# Altium footprint library CustomCase.PcbLib: 411 footprints (part 25 of 26)
Each footprint in its own frame and in the unit in brackets; x right, y up, seen from the top. Pads: shape width x height; smd on the part's side, far side on the other; paste and mask are expansions set on the pad; w line width, h text height; cw(c..) or ccw(c..) is an arc to the next point about the centre after c.
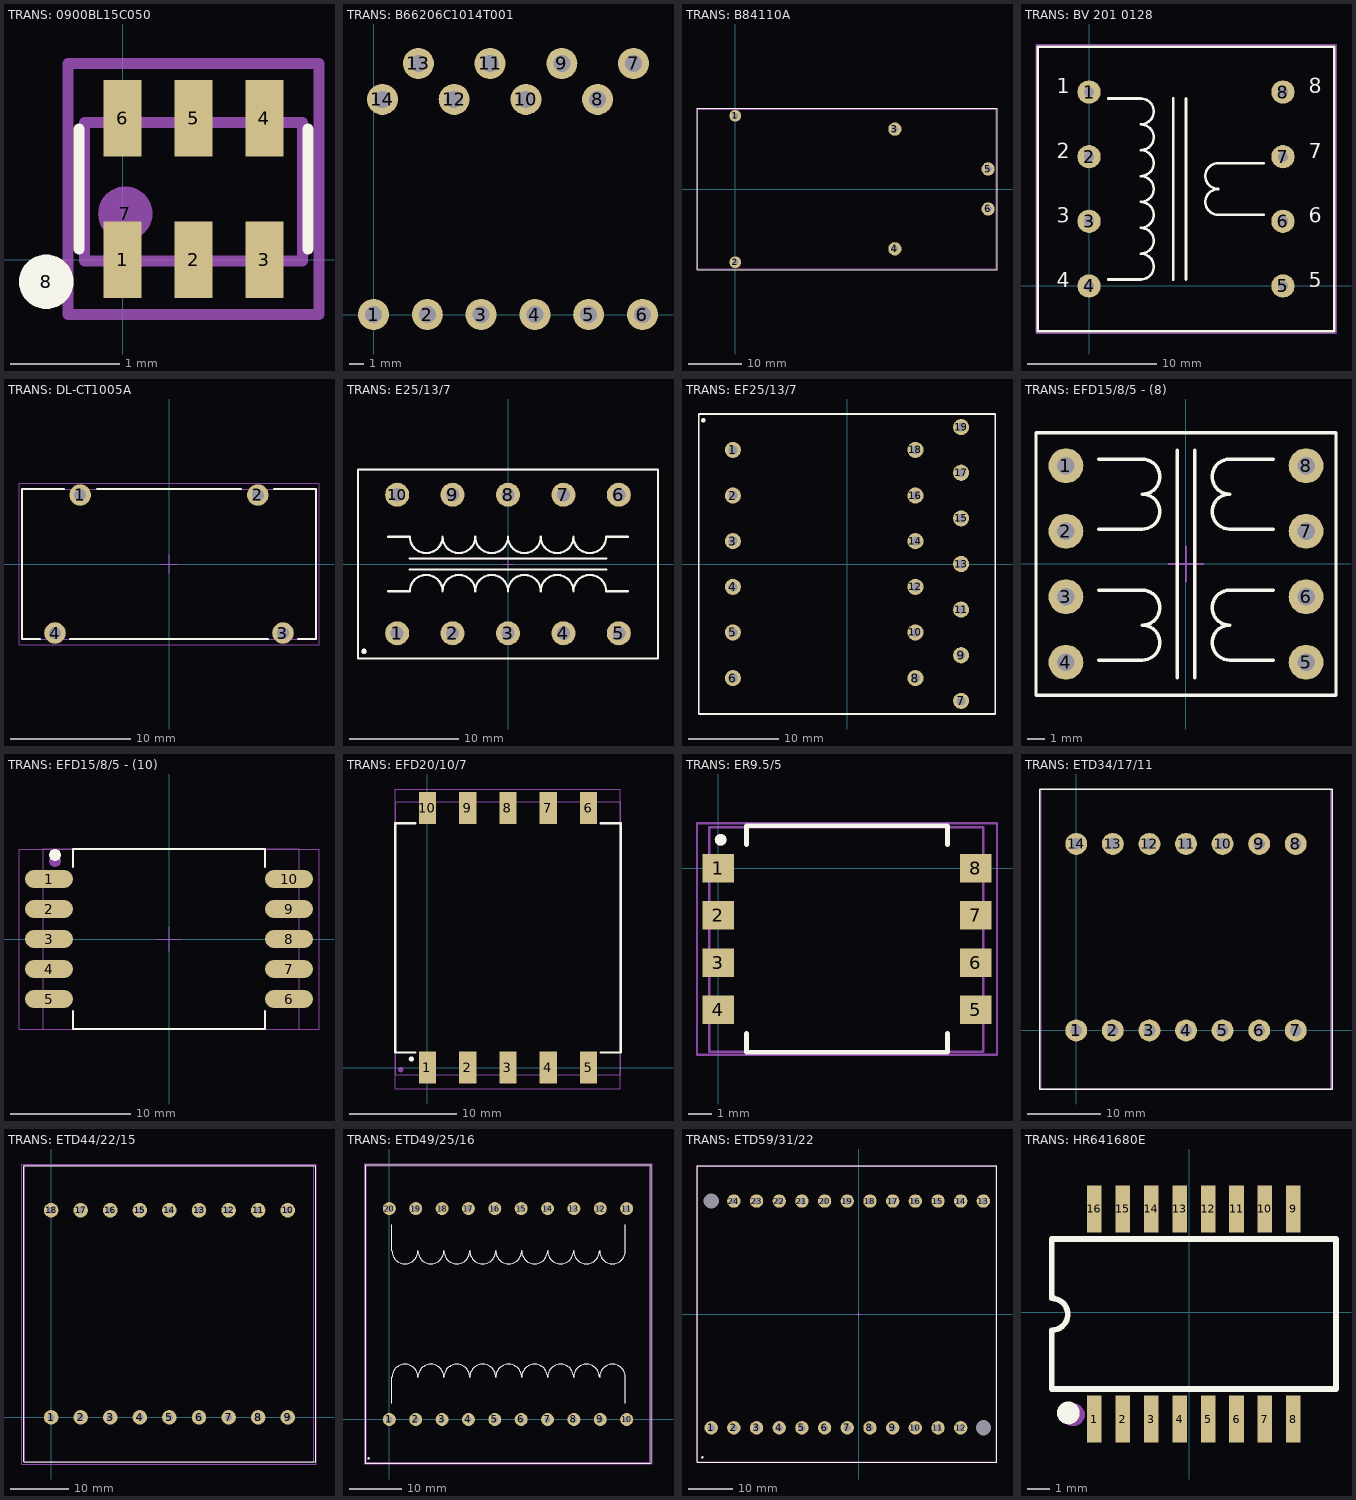
[diagram p24: the footprints below, top view; thin cyan lines are the x and y axes]

## TRANS: 0900BL15C050 [mm]
pads (8):
  rect 0.35x0.7 smd: 1(0,0) 2(0.65,0) 3(1.3,0) 4(1.3,1.3) 5(0.65,1.3) 6(0,1.3)
  round 0.5 on Mech1: 7(0.025,0.425)
  round 0.5 on Top Overlay: 8(-0.7,-0.2)
Top Overlay:
  lines w0.1: -0.4,0.1 -0.4,1.2 ; 1.7,0.1 1.7,1.2
Top Assy:
  lines w0.1: -0.35,-0.01 1.65,-0.01 1.65,1.26 -0.35,1.26 -0.35,-0.01
Size Area:
  lines w0.1: -0.5,-0.5 1.8,-0.5 1.8,1.8 -0.5,1.8 -0.5,-0.5
3D body "User Library-1600BL15B100E.STEP": height 0.84, standoff -0.02, extent -0.35,-0.01 1.65,1.26

## TRANS: B66206C1014T001 [mm]
pads (14):
  round 2.2 hole 1.2: 1(0,0) 2(3.81,0) 3(7.62,0) 4(11.43,0) 5(15.24,0) 6(19.05,0) 7(18.415,17.78) 8(15.875,15.24) 9(13.335,17.78) 10(10.795,15.24) 11(8.255,17.78) 12(5.715,15.24) 13(3.175,17.78) 14(0.635,15.24)

## TRANS: B84110A [mm]
pads (6):
  round 2.2 hole 1.1: 1(0,13.75) 2(0,-13.75)
  round 2.5 hole 1.2: 3(30,11.25) 4(30,-11.25) 5(47.5,3.75) 6(47.5,-3.75)
Top Overlay:
  lines w0.2: -7.175,-15.175 -7.175,15.175 49.175,15.175 49.175,-15.175 -7.175,-15.175
Top Assy:
  lines w0.1: 49,15 49,-15 -7,-15 -7,15 49,15 ; 49,15 49,15
Size Area:
  lines w0.1: -7,-15 49,-15 49,15 -7,15 -7,-15
3D body "B84110A.stp": height 23.1, standoff -4, extent -7,-15 49,15

## TRANS: BV 201 0128 [mm]
pads (8):
  round 1.8 hole 0.8: 1(0,15) 2(0,10) 3(0,5) 4(0,0) 5(15,0) 6(15,5) 7(15,10) 8(15,15)
Top Overlay:
  lines w0.2: 1.5,0.5 4,0.5 ccw(c4,1.5) 4,2.5 ccw(c4,3.5) 4,4.5 ccw(c4,5.5) 4,6.5 ccw(c4,7.5) 4,8.5 ccw(c4,9.5) 4,10.5 ccw(c4,11.5) 4,12.5 ccw(c4,13.5) 4,14.5 1.5,14.5 ; 6.5,0.5 6.5,14.5 ; 7.5,0.5 7.5,14.5 ; 13.5,5.5 10,5.5 cw(c10,6.5) 10,7.5 cw(c10,8.5) 10,9.5 13.5,9.5 ; -3.95,-3.5 -3.95,18.5 18.95,18.5 18.95,-3.5 -3.95,-3.5
  text "6" at 17,4.5 h2
  text "8" at 17,14.5 h2
  text "5" at 17,-0.5 h2
  text "7" at 17,9.5 h2
  text "3" at -2.5,4.5 h2
  text "1" at -2.5,14.5 h2
  text "4" at -2.5,-0.5 h2
  text "2" at -2.5,9.5 h2
Top Assy:
  lines w0.1: 1.5,0.5 4,0.5 ccw(c4,1.5) 4,2.5 ccw(c4,3.5) 4,4.5 ccw(c4,5.5) 4,6.5 ccw(c4,7.5) 4,8.5 ccw(c4,9.5) 4,10.5 ccw(c4,11.5) 4,12.5 ccw(c4,13.5) 4,14.5 1.5,14.5 ; 6.5,0.5 6.5,14.5 ; 7.5,0.5 7.5,14.5 ; 13.5,5.5 10,5.5 cw(c10,6.5) 10,7.5 cw(c10,8.5) 10,9.5 13.5,9.5 ; -3.95,-3.5 18.95,-3.5 18.95,18.5 -3.95,18.5 -3.95,-3.5
  text "8" at 17,14.5 h2
  text "7" at 17,9.5 h2
  text "6" at 17,4.5 h2
  text "5" at 17,-0.5 h2
  text "4" at -2.5,-0.5 h2
  text "3" at -2.5,4.5 h2
  text "2" at -2.5,9.5 h2
  text "1" at -2.5,14.5 h2
Size Area:
  lines w0.1: -4.1,-3.65 19.1,-3.65 19.1,18.65 -4.1,18.65 -4.1,-3.65
3D body "BV 201 0128.STEP": height 15, standoff -4, extent -3.95,-3.5 18.95,18.5

## TRANS: DL-CT1005A [mm]
pads (4):
  round 1.8 hole 1: 1(-7.4,5.75) 2(7.4,5.75) 3(9.5,-5.75) 4(-9.5,-5.75)
Top Overlay:
  lines w0.2: -10.75,-6.25 -12.25,-6.25 -12.25,6.25 -8.75,6.25 ; -8.25,-6.25 8.25,-6.25 ; -6,6.25 6,6.25 ; 8.75,6.25 12.25,6.25 12.25,-6.25 10.75,-6.25
3D model:
  lines w0.1: -12.25,-6.25 12.25,-6.25 12.25,6.25 -12.25,6.25 -12.25,-6.25
Size Area:
  lines w0.1: -0.75,0 0.75,0 ; 0,-0.75 0,0.75 ; -12.5,-6.75 -12.5,6.75 12.5,6.75 12.5,-6.75 -12.5,-6.75
3D body "DL-CT1005A.STEP": height 25.05, standoff -3.95, extent -12.25,-6.25 12.25,6.25

## TRANS: E25/13/7 [mm]
pads (12):
  round 2.2 hole 1.2: 1(-10.16,-6.35) 2(-5.08,-6.35) 3(0,-6.35) 4(5.08,-6.35) 5(10.16,-6.35) 6(10.16,6.35) 7(5.08,6.35) 8(0,6.35) 9(-5.08,6.35) 10(-10.16,6.35)
  round 0.5 on Mech1: ""(-13.2,-8)
  round 0.5 on Top Overlay: ""(-13.2,-8)
Top Overlay:
  lines w0.2: -11,-2.5 -9,-2.5 cw(c-7.5,-2.5) -6,-2.5 cw(c-4.5,-2.5) -3,-2.5 cw(c-1.5,-2.5) 0,-2.5 cw(c1.5,-2.5) 3,-2.5 cw(c4.5,-2.5) 6,-2.5 cw(c7.5,-2.5) 9,-2.5 11,-2.5 ; -11,2.5 -9,2.5 ccw(c-7.5,2.5) -6,2.5 ccw(c-4.5,2.5) -3,2.5 ccw(c-1.5,2.5) 0,2.5 ccw(c1.5,2.5) 3,2.5 ccw(c4.5,2.5) 6,2.5 ccw(c7.5,2.5) 9,2.5 11,2.5 ; -9,-0.5 9,-0.5 ; -9,0.5 9,0.5 ; -13.75,-8.65 -13.75,8.65 13.75,8.65 13.75,-8.65 -13.75,-8.65
Top Assy:
  lines w0.1: -11,-2.5 -9,-2.5 cw(c-7.5,-2.5) -6,-2.5 cw(c-4.5,-2.5) -3,-2.5 cw(c-1.5,-2.5) 0,-2.5 cw(c1.5,-2.5) 3,-2.5 cw(c4.5,-2.5) 6,-2.5 cw(c7.5,-2.5) 9,-2.5 11,-2.5 ; -11,2.5 -9,2.5 ccw(c-7.5,2.5) -6,2.5 ccw(c-4.5,2.5) -3,2.5 ccw(c-1.5,2.5) 0,2.5 ccw(c1.5,2.5) 3,2.5 ccw(c4.5,2.5) 6,2.5 ccw(c7.5,2.5) 9,2.5 11,2.5 ; -9,-0.5 9,-0.5 ; -9,0.5 9,0.5 ; -13.75,-8.65 -13.75,8.65 13.75,8.65 13.75,-8.65 -13.75,-8.65
Size Area:
  lines w0.1: -0.5,0 0.5,0 ; 0,-0.5 0,0.5 ; -13.75,-8.65 -13.75,8.65 13.75,8.65 13.75,-8.65 -13.75,-8.65
3D body "User Library-E25_13_7vsbore-1.STEP": height 26.85, standoff -3.5, extent -13.75,-8.65 13.75,8.65

## TRANS: EF25/13/7 [mm]
pads (20):
  round 1.8 hole 1: 1(-12.7,12.7) 2(-12.7,7.62) 3(-12.7,2.54) 4(-12.7,-2.54) 5(-12.7,-7.62) 6(-12.7,-12.7) 7(12.7,-15.24) 8(7.62,-12.7) 9(12.7,-10.16) 10(7.62,-7.62) 11(12.7,-5.08) 12(7.62,-2.54) 13(12.7,0) 14(7.62,2.54) 15(12.7,5.08) 16(7.62,7.62) 17(12.7,10.16) 18(7.62,12.7) 19(12.7,15.24)
  round 0.5 on Top Overlay: ""(-16,16)
Top Overlay:
  lines w0.2: -16.5,-16.7 -16.5,16.7 16.5,16.7 16.5,-16.7 -16.5,-16.7
3D body "Transformator 1 v19.step": height 19.95, standoff -3.45, extent -16.5,-16.74 16.55,16.74

## TRANS: EFD15/8/5 - (8) [mm]
pads (8):
  round 2 hole 1: 1(-6.875,5.625) 2(-6.875,1.875) 3(-6.875,-1.875) 4(-6.875,-5.625) 5(6.875,-5.625) 6(6.875,-1.875) 7(6.875,1.875) 8(6.875,5.625)
Top Overlay:
  lines w0.2: -5,-5.5 -2.5,-5.5 ccw(c-2.5,-4.5) -2.5,-3.5 ccw(c-2.5,-2.5) -2.5,-1.5 -5,-1.5 ; -5,2 -2.5,2 ccw(c-2.5,3) -2.5,4 ccw(c-2.5,5) -2.5,6 -5,6 ; -0.5,-6.5 -0.5,6.5 ; 0.5,-6.5 0.5,6.5 ; 5,-5.5 2.5,-5.5 cw(c2.5,-4.5) 2.5,-3.5 cw(c2.5,-2.5) 2.5,-1.5 5,-1.5 ; 5,2 2.5,2 cw(c2.5,3) 2.5,4 cw(c2.5,5) 2.5,6 5,6 ; -8.587,-7.5 8.588,-7.5 8.588,7.5 -8.587,7.5 -8.587,-7.5
Top Assy:
  lines w0.1: -8.587,-7.5 8.588,-7.5 8.588,7.5 -8.587,7.5 -8.587,-7.5
Size Area:
  lines w0.1: -1,0 1,0 ; 0,-1 0,1 ; -8.587,-7.5 8.588,-7.5 8.588,7.5 -8.587,7.5 -8.587,-7.5
3D body "999.STEP": height 8.41, standoff -3.1, extent -8.587,-7.5 8.588,7.5

## TRANS: EFD15/8/5 - (10) [mm]
pads (12):
  rrect100% 4x1.5 smd: 1(-10,5) 2(-10,2.5) 3(-10,0) 4(-10,-2.5) 5(-10,-5) 6(10,-5) 7(10,-2.5) 8(10,0) 9(10,2.5) 10(10,5)
  round 1 on Mech1: ""(-9.5,6.5)
  round 1 on Top Overlay: ""(-9.5,7)
Top Overlay:
  lines w0.2: -8,-6 -8,-7.5 8,-7.5 8,-6 ; -8,6 -8,7.5 8,7.5 8,6
Top Assy:
  lines w0.1: -10.5,-7.5 -10.5,7.5 10.85,7.5 10.85,-7.5 -10.5,-7.5
Size Area:
  lines w0.1: -1,0 1,0 ; 0,-1 0,1 ; -12.5,-7.5 12.5,-7.5 12.5,7.5 -12.5,7.5 -12.5,-7.5
3D body "EFD15.STEP": height 8.15, standoff -0.05, extent -10.5,-7.5 10.85,7.5

## TRANS: EFD20/10/7 [mm]
pads (12):
  rect 1.6x3 smd: 1(0,0) 2(3.76,0) 3(7.52,0) 4(11.28,0) 5(15.04,0) 6(15.04,24.22) 7(11.28,24.22) 8(7.52,24.22) 9(3.76,24.22) 10(0,24.22)
  round 0.5 on Mech1: ""(-2.5,-0.2)
  round 0.5 on Top Overlay: ""(-1.5,0.8)
Top Overlay:
  lines w0.2: -1.1,1.4 -3,1.4 -3,22.8 -1.1,22.8 ; 16.14,1.4 18.04,1.4 18.04,22.8 16.14,22.8
Top Assy:
  lines w0.1: -2.96,-0.685 18.04,-0.685 18.04,24.815 -2.96,24.815 -2.96,-0.685
Size Area:
  lines w0.1: -3,-2 18,-2 18,26 -3,26 -3,-2
3D body "EFD20 SMD.STEP": height 10.41, standoff 0, extent -3.06,-0.685 17.94,24.815

## TRANS: ER9.5/5 [mm]
pads (10):
  rect 1.35x1.2 smd: 1(0,0) 2(0,-2) 3(0,-4) 4(0,-6) 5(10.9,-6) 6(10.9,-4) 7(10.9,-2) 8(10.9,0)
  round 0.5 on Top Overlay: ""(0.1,1.2)
  round 0.5 on Mech1: ""(0.1,1.2)
Top Overlay:
  lines w0.2: 1.2,-7 1.2,-7.8 9.7,-7.8 9.7,-7 ; 1.2,1 1.2,1.8 9.7,1.8 9.7,1
Top Assy:
  lines w0.1: -0.387,-7.77 11.213,-7.77 11.213,1.73 -0.387,1.73 -0.387,-7.77
Size Area:
  lines w0.1: -0.9,-7.9 -0.9,1.9 11.8,1.9 11.8,-7.9 -0.9,-7.9
3D body "1.STEP": height 5.2, standoff -0.05, extent -0.387,-7.77 11.213,1.73

## TRANS: ETD34/17/11 [mm]
pads (14):
  round 3 hole 1.6: 1(0,0) 2(5,0) 3(10,0) 4(15,0) 5(20,0) 6(25,0) 7(30,0) 8(30,25.5) 9(25,25.5) 10(20,25.5) 11(15,25.5) 12(10,25.5) 13(5,25.5) 14(0,25.5)
Top Overlay:
  lines w0.2: -5,-8 35,-8 35,33 -5,33 -5,-8
Top Assy:
  lines w0.1: -4.8,-8 34.8,-8 34.8,33 -4.8,33 -4.8,-8
Size Area:
  lines w0.1: -5,-8 -5,33 35,33 35,-8 -5,-8
3D body "User Library-ETD34.STEP": height 32.9, standoff -2.44, extent -4.8,-8 34.8,33

## TRANS: ETD44/22/15 [mm]
pads (18):
  round 2.5 hole 1.2: 1(0,0) 2(5.08,0) 3(10.16,0) 4(15.24,0) 5(20.32,0) 6(25.4,0) 7(30.48,0) 8(35.56,0) 9(40.64,0) 10(40.64,35.56) 11(35.56,35.56) 12(30.48,35.56) 13(25.4,35.56) 14(20.32,35.56) 15(15.24,35.56) 16(10.16,35.56) 17(5.08,35.56) 18(0,35.56)
Top Overlay:
  lines w0.2: -4.7,-7.62 45.4,-7.62 45.4,43.18 -4.7,43.18 -4.7,-7.62
Top Assy:
  lines w0.1: -4.48,-7.72 45.12,-7.72 45.12,43.28 -4.48,43.28 -4.48,-7.72
Size Area:
  lines w0.1: -5,-8 -5,43.5 45.5,43.5 45.5,-8 -5,-8
3D body "User Library-ETD44.STEP": height 38.1, standoff -4.5, extent -4.48,-7.72 45.12,43.28

## TRANS: ETD49/25/16 [mm]
pads (21):
  round 2.5 hole 1.2: 1(0,0) 2(5.08,0) 3(10.16,0) 4(15.24,0) 5(20.32,0) 6(25.4,0) 7(30.48,0) 8(35.56,0) 9(40.64,0) 10(45.72,0) 11(45.72,40.64) 12(40.64,40.64) 13(35.56,40.64) 14(30.48,40.64) 15(25.4,40.64) 16(20.32,40.64) 17(15.24,40.64) 18(10.16,40.64) 19(5.08,40.64) 20(0,40.64)
  round 0.5 on Top Overlay: ""(-4,-7.5)
Top Overlay:
  lines w0.2: 0.5,3.14 0.5,8.14 cw(c3,8.14) 5.5,8.14 cw(c8,8.14) 10.5,8.14 cw(c13,8.14) 15.5,8.14 cw(c18,8.14) 20.5,8.14 cw(c23,8.14) 25.5,8.14 cw(c28,8.14) 30.5,8.14 cw(c33,8.14) 35.5,8.14 cw(c38,8.14) 40.5,8.14 cw(c43,8.14) 45.5,8.14 45.5,3.14 ; 0.5,37.5 0.5,32.5 ccw(c3,32.5) 5.5,32.5 ccw(c8,32.5) 10.5,32.5 ccw(c13,32.5) 15.5,32.5 ccw(c18,32.5) 20.5,32.5 ccw(c23,32.5) 25.5,32.5 ccw(c28,32.5) 30.5,32.5 ccw(c33,32.5) 35.5,32.5 ccw(c38,32.5) 40.5,32.5 ccw(c43,32.5) 45.5,32.5 45.5,37.5 ; -4.65,-8.425 50.375,-8.425 50.375,49.075 -4.65,49.075 -4.65,-8.425
Top Assy:
  lines w0.1: 0.5,3.14 0.5,8.14 cw(c3,8.14) 5.5,8.14 cw(c8,8.14) 10.5,8.14 cw(c13,8.14) 15.5,8.14 cw(c18,8.14) 20.5,8.14 cw(c23,8.14) 25.5,8.14 cw(c28,8.14) 30.5,8.14 cw(c33,8.14) 35.5,8.14 cw(c38,8.14) 40.5,8.14 cw(c43,8.14) 45.5,8.14 45.5,3.14 ; 0.5,37.5 0.5,32.5 ccw(c3,32.5) 5.5,32.5 ccw(c8,32.5) 10.5,32.5 ccw(c13,32.5) 15.5,32.5 ccw(c18,32.5) 20.5,32.5 ccw(c23,32.5) 25.5,32.5 ccw(c28,32.5) 30.5,32.5 ccw(c33,32.5) 35.5,32.5 ccw(c38,32.5) 40.5,32.5 ccw(c43,32.5) 45.5,32.5 45.5,37.5 ; -4.49,-8.28 50.21,-8.28 50.21,48.92 -4.49,48.92 -4.49,-8.28
Size Area:
  lines w0.1: -4.8,-8.575 -4.8,49.225 50.525,49.225 50.525,-8.575 -4.8,-8.575
3D body "222.STEP": height 41, standoff -3.86, extent -4.49,-8.28 50.21,48.92

## TRANS: ETD59/31/22 [mm]
pads (28):
  round 0.5 on Mech1: 1(-35,-32)
  round 0.5 on Top Overlay: 1(-35,-32)
  round 3 hole 1.6: 1(-33.02,-25.4) 2(-27.94,-25.4) 3(-22.86,-25.4) 4(-17.78,-25.4) 5(-12.7,-25.4) 6(-7.62,-25.4) 7(-2.54,-25.4) 8(2.54,-25.4) 9(7.62,-25.4) 10(12.7,-25.4) 11(17.78,-25.4) 12(22.86,-25.4) 13(27.94,25.4) 14(22.86,25.4) 15(17.78,25.4) 16(12.7,25.4) 17(7.62,25.4) 18(2.54,25.4) 19(-2.54,25.4) 20(-7.62,25.4) 21(-12.7,25.4) 22(-17.78,25.4) 23(-22.86,25.4) 24(-27.94,25.4)
  round 3 hole 3.4: ""(-33.02,25.4) ""(27.94,-25.4)
Top Overlay:
  lines w0.2: -36.2,-33.1 31,-33.1 31,33.3 -36.2,33.3 -36.2,-33.1
Top Assy:
  lines w0.1: -36.04,33.146 30.86,33.146 30.86,-32.953 -36.04,-32.953 -36.04,33.107 -36,33.146
Size Area:
  lines w0.1: -0.5,0 0.5,0 ; 0,-0.5 0,0.5 ; -36.2,-33.1 31,-33.1 31,33.3 -36.2,33.3 -36.2,-33.1
3D body "ETD59-31-22.STEP": height 51.38, standoff -1.62, extent -36.039,-32.953 30.86,33.146

## TRANS: HR641680E [mm]
pads (16):
  rect 0.65x2.1 smd: 1(-4.231,-4.773) 2(-2.961,-4.773) 3(-1.691,-4.773) 4(-0.421,-4.773) 5(0.849,-4.773) 6(2.119,-4.773) 7(3.389,-4.773) 8(4.659,-4.773) 9(4.659,4.627) 10(3.389,4.627) 11(2.119,4.627) 12(0.849,4.627) 13(-0.421,4.627) 14(-1.691,4.627) 15(-2.961,4.627) 16(-4.231,4.627)
Top Overlay:
  circle w0.508: c-5.396,-4.493 r0.254
  lines w0.254: -6.136,-0.793 -6.136,-3.423 6.564,-3.423 6.564,3.277 -6.136,3.277 ; -6.136,0.627 cw(c-6.131,-0.083) -6.126,-0.793 ; -6.136,0.642 -6.136,3.272
Size Area:
  circle w0.508: c-5.166,-4.573 r0.254
3D body "User Library-b78476a8247a003.step": height 5.6, standoff 0, extent -6.125,-4.9 6.575,4.5